# Altium footprint library Amin-Library.PcbLib: 601 footprints (part 38 of 38)
Each footprint in its own frame and in the unit in brackets; x right, y up, seen from the top. Pads: shape width x height; smd on the part's side, far side on the other; paste and mask are expansions set on the pad; w line width, h text height; cw(c..) or ccw(c..) is an arc to the next point about the centre after c.
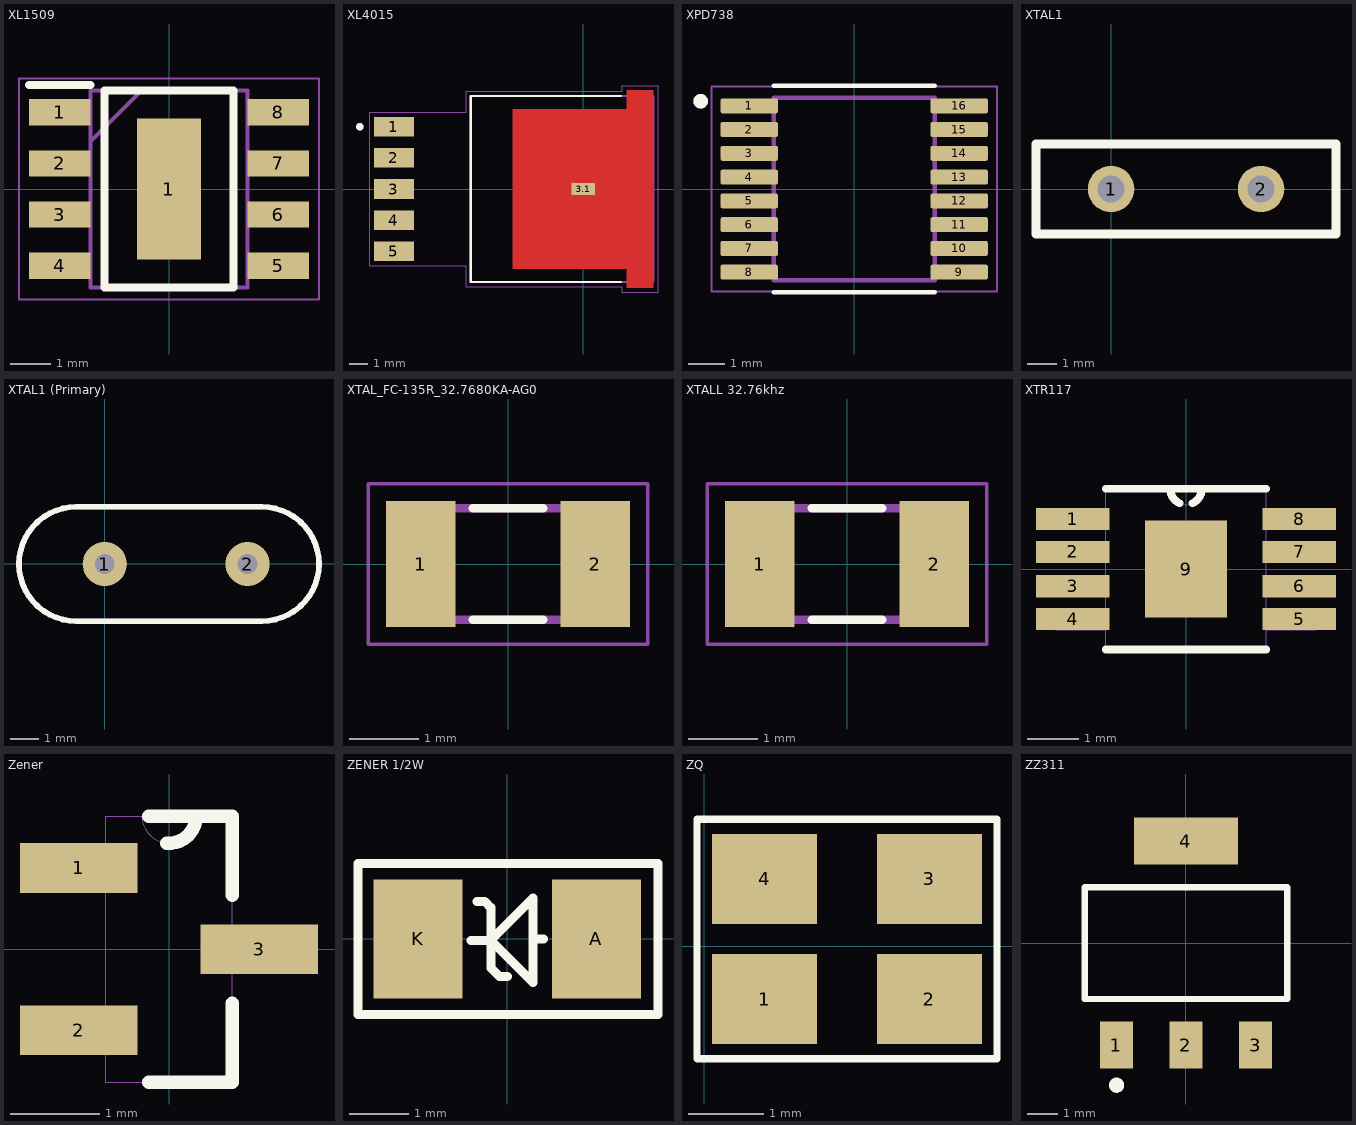
[diagram p37: the footprints below, top view; thin cyan lines are the x and y axes]

## XL1509 [mm]
pads (9):
  rect 1.525x0.65 smd paste-2539.97: 1(-2.712,1.905) 2(-2.712,0.635) 3(-2.712,-0.635) 4(-2.712,-1.905) 5(2.712,-1.905) 6(2.712,-0.635) 7(2.712,0.635) 8(2.712,1.905)
  rect 1.6x3.5 smd paste-2539.97: 1(0,0)
Top Overlay:
  lines w0.2: -3.475,2.58 -1.95,2.58 ; -1.6,-2.45 1.6,-2.45 1.6,2.45 -1.6,2.45 -1.6,-2.45
Top Paste:
  rectangle: -0.738,0.129 0.762,0.529
  rectangle: -0.738,-0.676 0.762,-0.276
  rectangle: -0.738,-1.48 0.762,-1.08
  rectangle: -0.738,0.933 0.762,1.333
  region: -3.475,1.655 -3.475,2.155 -1.95,2.155 -1.95,1.655
  region: -3.475,0.385 -3.475,0.885 -1.95,0.885 -1.95,0.385
  region: -3.475,-0.885 -3.475,-0.385 -1.95,-0.385 -1.95,-0.885
  region: -3.475,-2.155 -3.475,-1.655 -1.95,-1.655 -1.95,-2.155
  region: 1.95,-2.155 1.95,-1.655 3.475,-1.655 3.475,-2.155
  region: 1.95,-0.885 1.95,-0.385 3.475,-0.385 3.475,-0.885
  region: 1.95,0.385 1.95,0.885 3.475,0.885 3.475,0.385
  region: 1.95,1.655 1.95,2.155 3.475,2.155 3.475,1.655
Mechanical 13:
  lines w0.1: -1.95,1.18 -0.68,2.45 ; -1.95,-2.45 1.95,-2.45 1.95,2.45 -1.95,2.45 -1.95,-2.45
Mechanical 15:
  lines w0.05: -3.725,-2.75 3.725,-2.75 3.725,2.75 -3.725,2.75 -3.725,-2.75
3D body "FR9886SOGTR.stp": height 1.75, standoff 0, extent -3,-2.45 3,2.45

## XL4015 [mm]
pads (6):
  rect 2.16x1.07 smd: 1(-10.335,3.4) 2(-10.335,1.7) 3(-10.335,0) 4(-10.335,-1.7) 5(-10.335,-3.4)
  rect 1.27x0.635 smd paste-2 mask+0: 3.1(0,0)
Top Layer:
  region: 3.835,-5.4 2.365,-5.4 2.365,-4.35 -3.835,-4.35 -3.835,4.35 2.365,4.35 2.365,5.4 3.835,5.4
Top Overlay:
  circle w0.2: c-12.2,3.4 r0.1
  lines w0.127: 2.05,-5.08 -6.135,-5.08 -6.135,5.08 2.05,5.08
Top Paste:
  region: -0.6,0.88 -3.2,0.88 -3.2,3.48 -0.6,3.48
  region: 3.2,-3.48 0.6,-3.48 0.6,-0.88 3.2,-0.88
  region: -0.6,-3.48 -3.2,-3.48 -3.2,-0.88 -0.6,-0.88
  region: 3.2,0.88 0.6,0.88 0.6,3.48 3.2,3.48
Top Solder:
  region: 3.935,-5.5 2.265,-5.5 2.265,-4.45 -3.935,-4.45 -3.935,4.45 2.265,4.45 2.265,5.5 3.935,5.5
Mechanical 13:
  circle w0.2: c-12.2,3.4 r0.1
  lines w0.127: -6.135,-5.08 3.835,-5.08 3.835,5.08 -6.135,5.08 -6.135,-5.08
Mechanical 15:
  lines w0.05: -11.665,-4.185 -6.385,-4.185 -6.385,-5.33 2.12,-5.33 2.12,-5.65 4.085,-5.65 4.085,5.65 2.12,5.65 2.12,5.33 -6.385,5.33 -6.385,4.185 -11.665,4.185 -11.665,-4.185
3D body "User Library-TO-263 5Ld.step": height 4.57, standoff -0.01, extent -11.085,-5.08 3.556,5.08

## XPD738 [mm] "TSSOP-16"
height 1.2
pads (16):
  rrect25% 1.57x0.41 smd paste+0 mask+0.102: 1(-2.87,2.275) 2(-2.87,1.625) 3(-2.87,0.975) 4(-2.87,0.325) 5(-2.87,-0.325) 6(-2.87,-0.975) 7(-2.87,-1.625) 8(-2.87,-2.275) 9(2.87,-2.275) 10(2.87,-1.625) 11(2.87,-0.975) 12(2.87,-0.325) 13(2.87,0.325) 14(2.87,0.975) 15(2.87,1.625) 16(2.87,2.275)
Top Overlay:
  circle w0.2: c-4.2,2.4 r0.1
  lines w0.127: -2.2,-2.82 2.2,-2.82 ; -2.2,2.82 2.2,2.82
Mechanical 13:
  circle w0.2: c-4.2,2.4 r0.1
  lines w0.127: -2.2,-2.5 2.2,-2.5 2.2,2.5 -2.2,2.5 -2.2,-2.5
Mechanical 15:
  lines w0.05: -3.905,-2.8 3.905,-2.8 3.905,2.8 -3.905,2.8 -3.905,-2.8
3D body "step_temp.STEP": height 1.2, standoff 0, extent -3.2,-2.5 3.2,2.5

## XTAL1 [mil]
height 170.08
pads (2):
  round 62 hole 35.43: 1(0,0) 2(200,0)
Top Overlay:
  lines w12: -100,-60 -100,60 300,60 300,-60 -100,-60

## XTAL1 (Primary) [mm]
pads (2):
  round 1.575 hole 0.7 paste-2539.97 mask+0.1: 1(-0.009,-0.005) 2(5.071,-0.005)
Top Overlay:
  lines w0.2: -1.025,-2.037 cw(c-1.025,-0.005) -1.025,2.027 5.579,2.027 cw(c5.579,-0.005) 5.579,-2.037 -1.025,-2.037
Mechanical 4:
  lines w0.2: -1.025,-2.037 cw(c-1.025,-0.005) -1.025,2.027 5.579,2.027 cw(c5.579,-0.005) 5.579,-2.037 -1.025,-2.037

## XTAL_FC-135R_32.7680KA-AG0 [mm]
pads (2):
  rect 1x1.8 smd: 1(-1.25,0) 2(1.25,0)
Top Overlay:
  lines w0.127: -0.5,-0.8 0.5,-0.8 ; -0.5,0.8 0.5,0.8
Mechanical 4:
  lines w0.127: -1.65,-0.8 1.65,-0.8 ; -1.65,-0.8 -1.65,0.8 ; -1.65,-0.8 1.65,-0.8 ; -1.65,-0.8 -1.65,0.8 ; -1.65,0.8 1.65,0.8 ; -1.65,0.8 1.65,0.8 ; 1.65,-0.8 1.65,0.8 ; 1.65,-0.8 1.65,0.8
Mechanical 16:
  lines w0.05: -2,-1.15 2,-1.15 2,1.15 -2,1.15 -2,-1.15
3D body "User Library-ABS07.STEP": height 0.92, standoff 0.01, extent -1.61,-0.76 1.61,0.76

## XTALL 32.76khz [mm]
pads (2):
  rect 1x1.8 smd: 1(-1.25,0) 2(1.25,0)
Top Overlay:
  lines w0.127: -0.5,-0.8 0.5,-0.8 ; -0.5,0.8 0.5,0.8
Mechanical 4:
  lines w0.127: -1.65,-0.8 1.65,-0.8 ; -1.65,-0.8 -1.65,0.8 ; -1.65,-0.8 1.65,-0.8 ; -1.65,-0.8 -1.65,0.8 ; -1.65,0.8 1.65,0.8 ; -1.65,0.8 1.65,0.8 ; 1.65,-0.8 1.65,0.8 ; 1.65,-0.8 1.65,0.8
Mechanical 16:
  lines w0.05: -2,-1.15 2,-1.15 2,1.15 -2,1.15 -2,-1.15
3D body "User Library-ABS07.STEP": height 0.92, standoff 0.01, extent -1.61,-0.76 1.61,0.76

## XTR117 [mil]
pads (9):
  rect 56x17 smd: 1(-86,38) 2(-86,13) 3(-86,-13) 4(-86,-38) 5(86,-38) 6(86,-13) 7(86,13) 8(86,38)
  rect 62x74 smd: 9(0,0)
Top Overlay:
  lines w6: -61,-61 61,-61 ; -61,61 -12,61 ; -4.99,50 cw(c0.48,61.21) -12,60.99 ; 4.99,50 ccw(c-0.48,61.21) 12,60.99 ; 61,61 12,61 ; -12,61 12,61
Mechanical 1:
  lines w0: -12,61 ccw(c0,61) 12,61 ; -12,61 12,61 ; -12,61 -61,61 -61,-61 61,-61 61,61 12,61 ; -99,-46 -99,-31 -61,-31 -61,-46 -99,-46 ; -99,-20 -99,-5 -61,-5 -61,-20 -99,-20 ; -99,5 -99,20 -61,20 -61,5 -99,5 ; -99,31 -99,46 -61,46 -61,31 -99,31 ; 61,-46 61,-31 99,-31 99,-46 61,-46 ; 61,-20 61,-5 99,-5 99,-20 61,-20 ; 61,5 61,20 99,20 99,5 61,5 ; 61,31 61,46 99,46 99,31 61,31
3D body "XTR117AIDGKR.STEP": height 43.31, standoff 0, extent -96.46,-59.06 96.45,59.06

## Zener [mil]
pads (3):
  rect 52x22 smd: 1(-40,36) 2(-40,-36) 3(40,0)
Top Overlay:
  lines w6: -9,-59 28,-59 28,-24 ; -9,59 12,59 28,59 28,24 ; -1.04,47 ccw(c0,58.96) 12,58.96
Mechanical 4:
  lines w0: -49,-46 -49,-26 ; -49,-46 -28,-46 ; -49,-46 -49,-26 ; -49,-46 -28,-46 ; -49,-26 -28,-26 ; -49,-26 -28,-26 ; -49,26 -49,46 ; -49,26 -28,26 ; -49,26 -49,46 ; -49,26 -28,26 ; -49,46 -28,46 ; -49,46 -28,46 ; -28,-59 28,-59 ; -28,-59 -28,-46 ; -28,-59 28,-59 ; -28,-59 -28,-46 ; -28,-46 -28,-26 ; -28,-46 -28,-26 ; -28,-26 -28,26 ; -28,-26 -28,26 ; -28,26 -28,46 ; -28,26 -28,46 ; -28,46 -28,59 ; -28,46 -28,59 ; -28,59 -12,59 ; -28,59 -12,59 ; -12,59 ccw(c0,59) 12,59 ; -12,59 ccw(c0,59) 12,59 ; -12,59 12,59 ; -12,59 12,59 ; 12,59 28,59 ; 12,59 28,59 ; 28,-59 28,-10 ; 28,-59 28,-10 ; 28,-10 28,10 ; 28,-10 49,-10 ; 28,-10 28,10 ; 28,-10 49,-10 ; 28,10 28,59 ; 28,10 49,10 ; 28,10 28,59 ; 28,10 49,10 ; 49,-10 49,10 ; 49,-10 49,10
3D body "CircuitWorks-SOT-23.step": height 43.81, standoff 0.5, extent -49.21,-59.05 49.21,59.06

## ZENER 1/2W [mm]
pads (2):
  rect 1.5x2 smd: A(1.5,0) K(-1.5,0)
Top Overlay:
  lines w0.152: -0.613,-0.022 -0.276,-0.022 ; -0.508,0.635 -0.381,0.635 -0.276,0.53 -0.276,0.403 -0.276,-0.486 -0.127,-0.635 0,-0.635 ; 0.432,-0.004 0.613,-0.004 ; -0.276,-0.022 0.433,-0.731 0.433,0.687 -0.276,-0.022 ; -2.515,-1.27 2.54,-1.27 2.54,1.27 -2.515,1.27 -2.515,-1.27
3D body "User Library-smd diode 1206.STEP": height 1.48, standoff 0.03, extent -1.804,-0.707 1.696,0.743

## ZQ [mm]
pads (4):
  rect 1.4x1.2 smd: 1(0.8,-0.7) 2(3,-0.7) 3(3,0.9) 4(0.8,0.9)
Top Overlay:
  lines w0.1: -0.1,-1.5 3.9,-1.5 3.9,1.7 -0.1,1.7 -0.1,-1.5
3D body "ZQ3225.STEP": height 0.82, standoff 0, extent 0.3,-1.15 3.5,1.35

## ZZ311 [mm] "SOT-223/SC-73; 4 Leads; Body 6.7 x 7.3 mm, inc. leads (LxW max)"
height 1.8
pads (4):
  rect 1.1x1.55 smd: 1(-2.3,-3.375) 2(0,-3.375) 3(2.3,-3.375)
  rect 3.45x1.55 smd: 4(0,3.375)
Top Overlay:
  circle w0.25: c-2.3,-4.7 r0.125
  lines w0.2: -3.35,-1.85 -3.35,1.85 3.35,1.85 3.35,-1.85 -3.35,-1.85